# Altium footprint library PCB_ConnectorHDR.PcbLib: 139 footprints (part 9 of 9)
Each footprint in its own frame and in the unit in brackets; x right, y up, seen from the top. Pads: shape width x height; smd on the part's side, far side on the other; paste and mask are expansions set on the pad; w line width, h text height; cw(c..) or ccw(c..) is an arc to the next point about the centre after c.
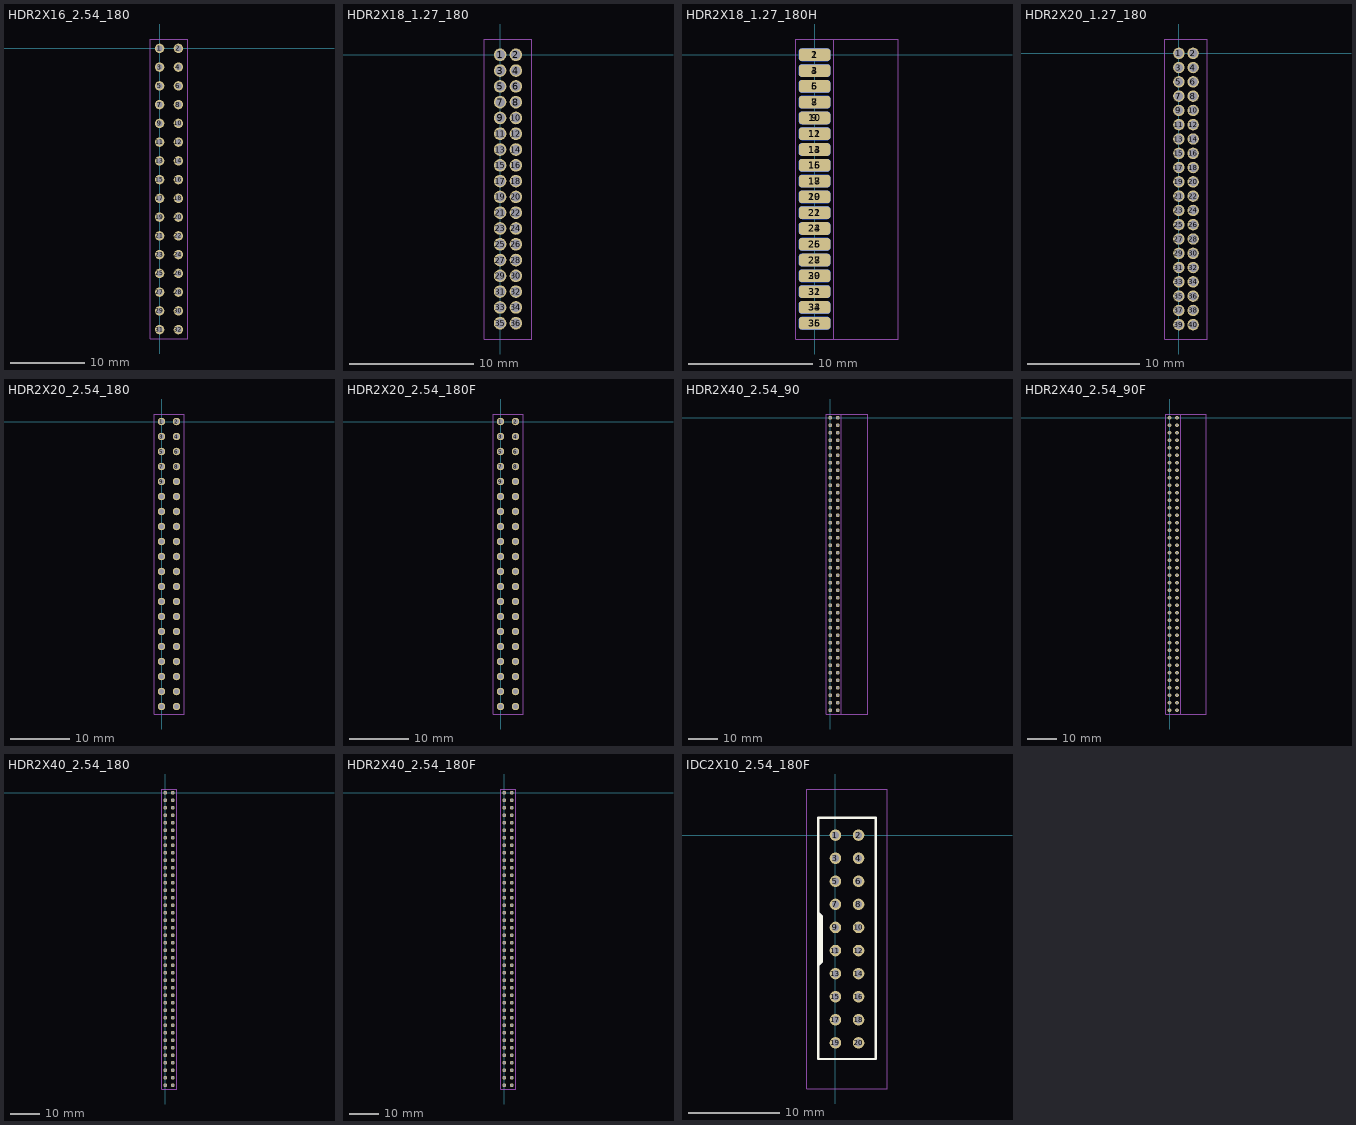
[diagram p8: the footprints below, top view; thin cyan lines are the x and y axes]

## HDR2X16_2.54_180 [mil]
height 169.29
pads (32):
  round 50 hole 32: 1(0,0) 2(100,0) 3(0,-100) 4(100,-100) 5(0,-200) 6(100,-200) 7(0,-300) 8(100,-300) 9(0,-400) 10(100,-400) 11(0,-500) 12(100,-500) 13(0,-600) 14(100,-600) 15(0,-700) 16(100,-700) 17(0,-800) 18(100,-800) 19(0,-900) 20(100,-900) 21(0,-1000) 22(100,-1000) 23(0,-1100) 24(100,-1100) 25(0,-1200) 26(100,-1200) 27(0,-1300) 28(100,-1300) 29(0,-1400) 30(100,-1400) 31(0,-1500) 32(100,-1500)
Mechanical 13:
  lines w2: -50,-1550 -50,50 150,50 150,-1550 -50,-1550
T-Component:
  lines w2: -50,-1550 -50,50 150,50 150,-1550 -50,-1550
  text ".Designator" at 19,-770 h80
3D body "pin_header_awl254-dg-g32d.stp": height 334.65, standoff -118.11, extent -50,-1550 150,50

## HDR2X18_1.27_180 [mil]
height 169.29
pads (36):
  round 40 hole 30: 1(0,0) 2(50,0) 3(0,-50) 4(50,-50) 5(0,-100) 6(50,-100) 7(0,-150) 8(50,-150) 9(0,-200) 10(50,-200) 11(0,-250) 12(50,-250) 13(0,-300) 14(50,-300) 15(0,-350) 16(50,-350) 17(0,-400) 18(50,-400) 19(0,-450) 20(50,-450) 21(0,-500) 22(50,-500) 23(0,-550) 24(50,-550) 25(0,-600) 26(50,-600) 27(0,-650) 28(50,-650) 29(0,-700) 30(50,-700) 31(0,-750) 32(50,-750) 33(0,-800) 34(50,-800) 35(0,-850) 36(49.99,-850)
Mechanical 13:
  lines w2: -50,-900 -50,50 100,50 100,-900 -50,-900
T-Component:
  lines w2: -50,-900 -50,50 100,50 100,-900 -50,-900
  text ".Designator" at -6,-445 h80
3D body "pin_header_a-sl127-dg-g36d.stp": height 210.24, standoff -102.36, extent -73.43,-874.99 123.43,25.01

## HDR2X18_1.27_180H [mil]
height 169.29
pads (36):
  rrect50% 100x40 smd: 1(0,0) 3(0,-50) 5(0,-100) 7(0,-150) 9(0,-200) 11(0,-250) 13(0,-300) 15(0,-350) 17(0,-400) 19(0,-450) 21(0,-500) 23(0,-550) 25(0,-600) 27(0,-650) 29(0,-700) 31(0,-750) 33(0,-800) 35(0,-850)
  rrect50% 100x40 smd far side: 2(0,0) 4(0,-50) 6(0,-100) 8(0,-150) 10(0,-200) 12(0,-250) 14(0,-300) 16(0,-350) 18(0,-400) 20(0,-450) 22(0,-500) 24(0,-550) 26(0,-600) 28(0,-650) 30(0,-700) 32(0,-750) 34(0,-800) 36(0,-850)
Mechanical 13:
  lines w2: -60,-900 -60,50 265,50 265,-900 -60,-900
T-Component:
  lines w2: -60,-900 -60,50 60,50 60,-900 -60,-900
  text ".Designator" at -31,-445 h80
3D body "pin_header_a-sl127-dg-g36d.stp": height 76.43, standoff -120.43, extent -47.36,-874.99 265.24,25.01

## HDR2X20_1.27_180 [mil]
height 169.29
pads (40):
  round 40 hole 30: 1(0,0) 2(50,0) 3(0,-50) 4(50,-50) 5(0,-100) 6(50,-100) 7(0,-150) 8(50,-150) 9(0,-200) 10(50,-200) 11(0,-250) 12(50,-250) 13(0,-300) 14(50,-300) 15(0,-350) 16(50,-350) 17(0,-400) 18(50,-400) 19(0,-450) 20(50,-450) 21(0,-500) 22(50,-500) 23(0,-550) 24(50,-550) 25(0,-600) 26(50,-600) 27(0,-650) 28(50,-650) 29(0,-700) 30(50,-700) 31(0,-750) 32(50,-750) 33(0,-800) 34(50,-800) 35(0,-850) 36(49.99,-850) 37(-0.01,-900) 38(49.99,-900) 39(-0.01,-950) 40(49.99,-950)
Mechanical 13:
  lines w2: -50,-1000 -50,50 100,50 100,-1000 -50,-1000
T-Component:
  lines w2: -50,-1000 -50,50 100,50 100,-1000 -50,-1000
  text ".Designator" at -6,-495 h80

## HDR2X20_2.54_180 [mil]
height 169.29
pads (40):
  round 50 hole 32: 1(0,0) 2(100,0) 3(0,-100) 4(100,-100) 5(0,-200) 6(100,-200) 7(0,-300) 8(100,-300) 9(0,-400) 10(100,-400) 11(0,-500) 12(100,-500) 13(0,-600) 14(100,-600) 15(0,-700) 16(100,-700) 17(0,-800) 18(100,-800) 19(0,-900) 20(100,-900) 21(0,-1000) 22(100,-1000) 23(0,-1100) 24(100,-1100) 25(0,-1200) 26(100,-1200) 27(0,-1300) 28(100,-1300) 29(0,-1400) 30(100,-1400) 31(0,-1500) 32(100,-1500) 33(0,-1600) 34(100,-1600) 35(0,-1700) 36(100,-1700) 37(0,-1800) 38(100,-1800) 39(0,-1900) 40(100,-1900)
Mechanical 13:
  lines w2: -50,-1950 150,-1950 150,50 -50,50 -50,-1950
T-Component:
  lines w2: -50,-1950 150,-1950 150,50 -50,50 -50,-1950
  text ".Designator" at 19,-970 h80
3D body "pin_header_awl254-dg-g40d.stp": height 334.65, standoff -118.11, extent -49.99,-1950 150.01,50

## HDR2X20_2.54_180F [mil]
height 169.29
pads (40):
  round 50 hole 32: 1(0,0) 2(100,0) 3(0,-100) 4(100,-100) 5(0,-200) 6(100,-200) 7(0,-300) 8(100,-300) 9(0,-400) 10(100,-400) 11(0,-500) 12(100,-500) 13(0,-600) 14(100,-600) 15(0,-700) 16(100,-700) 17(0,-800) 18(100,-800) 19(0,-900) 20(100,-900) 21(0,-1000) 22(100,-1000) 23(0,-1100) 24(100,-1100) 25(0,-1200) 26(100,-1200) 27(0,-1300) 28(100,-1300) 29(0,-1400) 30(100,-1400) 31(0,-1500) 32(100,-1500) 33(0,-1600) 34(100,-1600) 35(0,-1700) 36(100,-1700) 37(0,-1800) 38(100,-1800) 39(0,-1900) 40(100,-1900)
Mechanical 13:
  lines w2: -50,-1950 -50,50 150,50 150,-1950 -50,-1950
T-Component:
  lines w2: -50,-1950 150,-1950 150,50 -50,50 -50,-1950
  text ".Designator" at 19,-970 h80
3D body "female_header_a-bl254-dg-g40d.stp": height 334.65, standoff -125.98, extent -48.42,-1954.92 148.43,54.92

## HDR2X40_2.54_90 [mil]
height 169.29
pads (80):
  round 50 hole 32: 1(0,0) 2(100,0) 3(0,-100) 4(100,-100) 5(0,-200) 6(100,-200) 7(0,-300) 8(100,-300) 9(0,-400) 10(100,-400) 11(0,-500) 12(100,-500) 13(0,-600) 14(100,-600) 15(0,-700) 16(100,-700) 17(0,-800) 18(100,-800) 19(0,-900) 20(100,-900) 21(0,-1000) 22(100,-1000) 23(0,-1100) 24(100,-1100) 25(0,-1200) 26(100,-1200) 27(0,-1300) 28(100,-1300) 29(0,-1400) 30(100,-1400) 31(0,-1500) 32(100,-1500) 33(0,-1600) 34(100,-1600) 35(0,-1700) 36(100,-1700) 37(0,-1800) 38(100,-1800) 39(0,-1900) 40(100,-1900) 41(0,-2000) 42(100,-2000) 43(0,-2100) 44(100,-2100) 45(0,-2200) 46(100,-2200) 47(0,-2300) 48(100,-2300) 49(0,-2400) 50(100,-2400) 51(0,-2500) 52(100,-2500) 53(0,-2600) 54(100,-2600) 55(0,-2700) 56(100,-2700) 57(0,-2800) 58(100,-2800) 59(0,-2900) 60(100,-2900) 61(0,-3000) 62(100,-3000) 63(0,-3100) 64(100,-3100) 65(0,-3200) 66(100,-3200) 67(0,-3300) 68(100,-3300) 69(0,-3400) 70(100,-3400) 71(0,-3500) 72(100,-3500) 73(0,-3600) 74(100,-3600) 75(0,-3700) 76(100,-3700) 77(0,-3800) 78(100,-3800) 79(0,-3900) 80(100,-3900)
Mechanical 13:
  lines w2: -50,-3950 500,-3950 500,50 -50,50 -50,-3950
T-Component:
  lines w2: -50,-3950 -50,50 150,50 150,-3950 -50,-3950
  text ".Designator" at 19,-1970 h80
3D body "pin_header_awl254-da-g80d.stp": height 198.43, standoff -116.54, extent -12.44,-3945 494.64,55

## HDR2X40_2.54_90F [mil]
height 169.29
pads (80):
  round 50 hole 32: 1(0,0) 2(100,0) 3(0,-100) 4(100,-100) 5(0,-200) 6(100,-200) 7(0,-300) 8(100,-300) 9(0,-400) 10(100,-400) 11(0,-500) 12(100,-500) 13(0,-600) 14(100,-600) 15(0,-700) 16(100,-700) 17(0,-800) 18(100,-800) 19(0,-900) 20(100,-900) 21(0,-1000) 22(100,-1000) 23(0,-1100) 24(100,-1100) 25(0,-1200) 26(100,-1200) 27(0,-1300) 28(100,-1300) 29(0,-1400) 30(100,-1400) 31(0,-1500) 32(100,-1500) 33(0,-1600) 34(100,-1600) 35(0,-1700) 36(100,-1700) 37(0,-1800) 38(100,-1800) 39(0,-1900) 40(100,-1900) 41(0,-2000) 42(100,-2000) 43(0,-2100) 44(100,-2100) 45(0,-2200) 46(100,-2200) 47(0,-2300) 48(100,-2300) 49(0,-2400) 50(100,-2400) 51(0,-2500) 52(100,-2500) 53(0,-2600) 54(100,-2600) 55(0,-2700) 56(100,-2700) 57(0,-2800) 58(100,-2800) 59(0,-2900) 60(100,-2900) 61(0,-3000) 62(100,-3000) 63(0,-3100) 64(100,-3100) 65(0,-3200) 66(100,-3200) 67(0,-3300) 68(100,-3300) 69(0,-3400) 70(100,-3400) 71(0,-3500) 72(100,-3500) 73(0,-3600) 74(100,-3600) 75(0,-3700) 76(100,-3700) 77(0,-3800) 78(100,-3800) 79(0,-3900) 80(100,-3900)
Mechanical 13:
  lines w2: -50,-3950 -50,50 490,50 490,-3950 -50,-3950
T-Component:
  lines w2: -50,-3950 150,-3950 150,50 -50,50 -50,-3950
  text ".Designator" at 19,-1970 h80
3D body "female_header_a-bl254-da-g80d.stp": height 198.43, standoff -124.41, extent -10,-3949.92 486.06,59.92

## HDR2X40_2.54_180 [mil]
height 169.29
pads (80):
  round 50 hole 32: 1(0,0) 2(100,0) 3(0,-100) 4(100,-100) 5(0,-200) 6(100,-200) 7(0,-300) 8(100,-300) 9(0,-400) 10(100,-400) 11(0,-500) 12(100,-500) 13(0,-600) 14(100,-600) 15(0,-700) 16(100,-700) 17(0,-800) 18(100,-800) 19(0,-900) 20(100,-900) 21(0,-1000) 22(100,-1000) 23(0,-1100) 24(100,-1100) 25(0,-1200) 26(100,-1200) 27(0,-1300) 28(100,-1300) 29(0,-1400) 30(100,-1400) 31(0,-1500) 32(100,-1500) 33(0,-1600) 34(100,-1600) 35(0,-1700) 36(100,-1700) 37(0,-1800) 38(100,-1800) 39(0,-1900) 40(100,-1900) 41(0,-2000) 42(100,-2000) 43(0,-2100) 44(100,-2100) 45(0,-2200) 46(100,-2200) 47(0,-2300) 48(100,-2300) 49(0,-2400) 50(100,-2400) 51(0,-2500) 52(100,-2500) 53(0,-2600) 54(100,-2600) 55(0,-2700) 56(100,-2700) 57(0,-2800) 58(100,-2800) 59(0,-2900) 60(100,-2900) 61(0,-3000) 62(100,-3000) 63(0,-3100) 64(100,-3100) 65(0,-3200) 66(100,-3200) 67(0,-3300) 68(100,-3300) 69(0,-3400) 70(100,-3400) 71(0,-3500) 72(100,-3500) 73(0,-3600) 74(100,-3600) 75(0,-3700) 76(100,-3700) 77(0,-3800) 78(100,-3800) 79(0,-3900) 80(100,-3900)
Mechanical 13:
  lines w2: -50,-3950 150,-3950 150,50 -50,50 -50,-3950
T-Component:
  lines w2: -50,-3950 -50,50 150,50 150,-3950 -50,-3950
  text ".Designator" at 19,-1970 h80

## HDR2X40_2.54_180F [mil]
height 169.29
pads (80):
  round 50 hole 32: 1(0,0) 2(100,0) 3(0,-100) 4(100,-100) 5(0,-200) 6(100,-200) 7(0,-300) 8(100,-300) 9(0,-400) 10(100,-400) 11(0,-500) 12(100,-500) 13(0,-600) 14(100,-600) 15(0,-700) 16(100,-700) 17(0,-800) 18(100,-800) 19(0,-900) 20(100,-900) 21(0,-1000) 22(100,-1000) 23(0,-1100) 24(100,-1100) 25(0,-1200) 26(100,-1200) 27(0,-1300) 28(100,-1300) 29(0,-1400) 30(100,-1400) 31(0,-1500) 32(100,-1500) 33(0,-1600) 34(100,-1600) 35(0,-1700) 36(100,-1700) 37(0,-1800) 38(100,-1800) 39(0,-1900) 40(100,-1900) 41(0,-2000) 42(100,-2000) 43(0,-2100) 44(100,-2100) 45(0,-2200) 46(100,-2200) 47(0,-2300) 48(100,-2300) 49(0,-2400) 50(100,-2400) 51(0,-2500) 52(100,-2500) 53(0,-2600) 54(100,-2600) 55(0,-2700) 56(100,-2700) 57(0,-2800) 58(100,-2800) 59(0,-2900) 60(100,-2900) 61(0,-3000) 62(100,-3000) 63(0,-3100) 64(100,-3100) 65(0,-3200) 66(100,-3200) 67(0,-3300) 68(100,-3300) 69(0,-3400) 70(100,-3400) 71(0,-3500) 72(100,-3500) 73(0,-3600) 74(100,-3600) 75(0,-3700) 76(100,-3700) 77(0,-3800) 78(100,-3800) 79(0,-3900) 80(100,-3900)
T-Component:
  lines w2: -50,-3950 -50,50 150,50 150,-3950 -50,-3950
  text ".Designator" at 19,-1970 h80
3D body "female_header_a-bl254-dg-g80d.stp": height 334.65, standoff -125.98, extent -48.42,-3954.92 148.43,54.93

## IDC2X10_2.54_180F [mil]
height 169.29
pads (20):
  round 50 hole 32: 1(0,0) 2(100,0) 3(0,-100) 4(100,-100) 5(0,-200) 6(100,-200) 7(0,-300) 8(100,-300) 9(0,-400) 10(100,-400) 11(0,-500) 12(100,-500) 13(0,-600) 14(100,-600) 15(0,-700) 16(100,-700) 17(0,-800) 18(100,-800) 19(0,-900) 20(100,-900)
Top Overlay:
  region: -75,-335 -75,-565 -60,-550 -60,-350
  lines w10: -75,-565 -60,-550 -60,-350 -75,-335 ; -75,-565 -75,-970 175,-970 175,75 -75,75 -75,-335 ; -75,-565 -75,-335
Mechanical 13:
  lines w2: -125,-1100 225,-1100 225,200 -125,200 -125,-1100
T-Component:
  lines w2: -125,-1100 -125,200 225,200 225,-1100 -125,-1100
  text ".Designator" at 19,-470 h80
3D body "SW3dPS-PinBox Connector_20Pin.STEP": height 429.13, standoff -118.11, extent -123.23,-1100 223.23,199.21